# Altium footprint library KINGHELM_KH-TYPE-C-16P.PcbLib: 1 footprints
Each footprint in its own frame and in the unit in brackets; x right, y up, seen from the top. Pads: shape width x height; smd on the part's side, far side on the other; paste and mask are expansions set on the pad; w line width, h text height; cw(c..) or ccw(c..) is an arc to the next point about the centre after c.
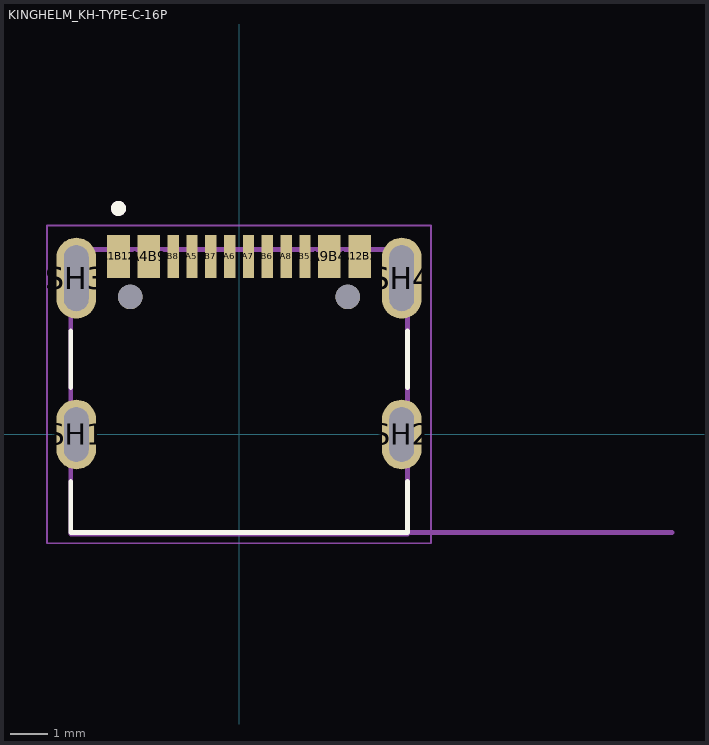
[diagram p0: the footprint, top view; thin cyan lines are the x and y axes]

## KINGHELM_KH-TYPE-C-16P [mm]
height 3.41
pads (18):
  rect 0.6x1.15 smd paste+0 mask+0: A1B12(-3.2,4.725) A4B9(-2.4,4.725) A9B4(2.4,4.725) A12B1(3.2,4.725)
  rect 0.3x1.15 smd paste+0 mask+0: A5(-1.25,4.725) A6(-0.25,4.725) A7(0.25,4.725) A8(1.25,4.725) B5(1.75,4.725) B6(0.75,4.725) B7(-0.75,4.725) B8(-1.75,4.725)
  oval 1.05x1.85 hole 0.65 slot 1.45 at 90 deg mask+0.102: SH1(-4.32,0) SH2(4.32,0)
  oval 1.05x2.15 hole 0.65 slot 1.75 at 90 deg mask+0.102: SH3(-4.32,4.15) SH4(4.32,4.15)
  round 0.65 hole 0.65 unplated mask+0: ""(-2.89,3.65) ""(2.89,3.65)
Top Overlay:
  circle w0.2: c-3.2,6 r0.1
  lines w0.127: -4.47,-1.25 -4.47,-2.6 4.47,-2.6 4.47,-1.25 ; -4.47,1.25 -4.47,2.75 ; 4.47,1.25 4.47,2.75
Assembly Top:
  circle w0.2: c-3.2,6 r0.1
  lines w0.127: 11.5,-2.6 4.47,-2.6 ; -4.47,-2.6 -4.47,-2.64 4.47,-2.64 4.47,-2.6 ; -4.47,-2.6 -4.47,4.91 4.47,4.91 4.47,-2.6 ; -4.47,-2.6 4.47,-2.6
  text "PCB EDGE" at 5.5,-2.25 h0.81
Courtyard Top:
  lines w0.05: -5.095,-2.89 -5.095,5.55 5.095,5.55 5.095,-2.89 -5.095,-2.89
3D body "step_temp.STEP": height 3.41, standoff -1.1, extent -4.47,-3.905 4.47,3.905